# Altium footprint library PBL - SMD Packages.PcbLib: 148 footprints (part 10 of 10)
Each footprint in its own frame and in the unit in brackets; x right, y up, seen from the top. Pads: shape width x height; smd on the part's side, far side on the other; paste and mask are expansions set on the pad; w line width, h text height; cw(c..) or ccw(c..) is an arc to the next point about the centre after c.
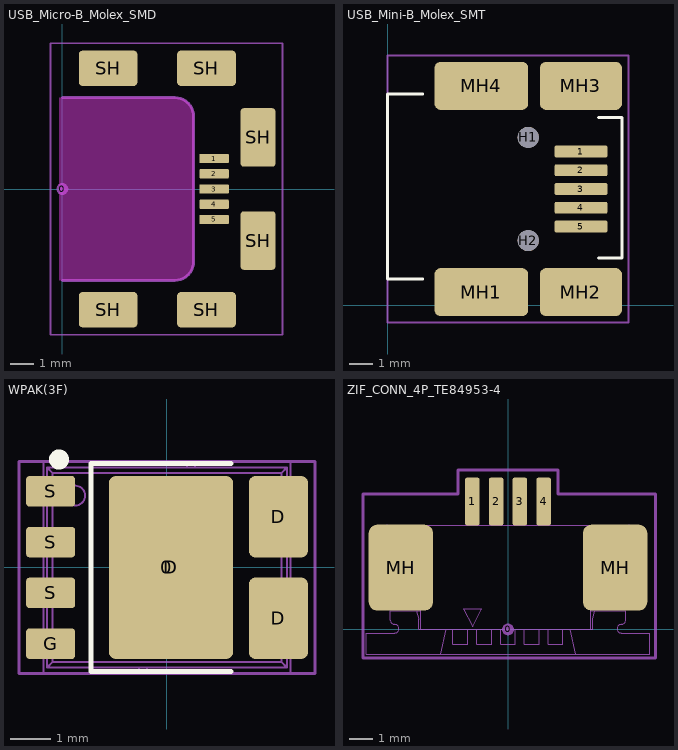
[diagram p9: the footprints below, top view; thin cyan lines are the x and y axes]

## USB_Micro-B_Molex_SMD [mm]
height 1.2
pads (12):
  round 0.508 on Mech15: 0(0,0)
  rrect20% 1.25x0.4 smd: 1(6.475,1.3) 2(6.475,0.65) 3(6.475,0) 4(6.475,-0.65) 5(6.475,-1.3)
  rrect20% 2.5x1.5 smd: SH(1.95,-5.15) SH(1.95,5.15) SH(6.15,-5.15) SH(6.15,5.15)
  rrect20% 1.5x2.5 smd: SH(8.35,-2.2) SH(8.35,2.2)
Top Solder:
  rectangle: 5.842,-1.27 7.112,1.27
Keep-Out Layer:
  board cut-out: -0.127,3.9 4.8,3.907 5.009,3.879 5.203,3.799 5.371,3.671 5.499,3.503 5.579,3.309 5.607,3.1 5.6,3.1 5.607,-3.1 5.579,-3.309 5.499,-3.503 5.371,-3.671 5.203,-3.799 5.009,-3.879 4.8,-3.907 4.8,-3.9 -0.127,-3.9
13 - 3D Top Side:
  lines w0.127: 0,-3.9 4.8,-3.9 ccw(c4.8,-3.1) 5.6,-3.1 5.6,3.1 ccw(c4.8,3.1) 4.8,3.9 0,3.9
15 - Top Courtyards:
  lines w0.076: -0.5,-6.223 -0.5,6.223 9.398,6.223 9.398,-6.223 -0.5,-6.223
3D body: height 4.1, standoff -4.1, extent -21.007,-5.35 3.492,5.35
3D body: height 1.43, standoff -1.52, extent -0.43,-5.5 8.7,5.5

## USB_Mini-B_Molex_SMT [mm]
height 3.95
pads (11):
  rrect25% 2.25x0.5 smd: 1(8.25,6.55) 2(8.25,5.75) 3(8.25,4.95) 4(8.25,4.15) 5(8.25,3.35)
  round 0.9 hole 0.9 unplated: H1(6,7.15) H2(6,2.75)
  rrect25% 4x2.05 smd: MH1(4,0.55) MH4(4,9.35)
  rrect25% 3.5x2.05 smd: MH2(8.25,0.55) MH3(8.25,9.35)
Top Overlay:
  lines w0.127: 1.5,1.1 0,1.1 0,9 1.5,9 ; 9,2 10,2 10,8 9,8
15 - Top Courtyards:
  lines w0.076: 0,-0.75 10.275,-0.75 10.275,10.65 0,10.65 0,-0.75
3D body: height 3.95, standoff 0, extent 0,1.1 9,9

## WPAK(3F) [mm] "Footprint similar to SOIC-8, Body 5.1x6.1mm, Pitch 1.27mm, IPC Medium Density"
height 0.85
pads (8):
  round 1 on Mech15: 0(0,0)
  rrect10% 3.1x4.57 smd: D(0.1,0)
  rrect20% 1.47x2.03 smd: D(2.785,-1.27) D(2.785,1.27)
  rrect20% 1.22x0.76 smd: G(-2.91,-1.905) S(-2.91,-0.635) S(-2.91,0.635) S(-2.91,1.905)
Top Overlay:
  circle w0.25: c-2.7,2.7 r0.125
  lines w0.127: 1.6,-2.6 -1.9,-2.6 -1.9,2.6 1.6,2.6
13 - 3D Top Side:
  circle w0.05: c-2.298,1.798 r0.25
  lines w0.05: -3.09,-2.115 -3.09,-2.64 -0.7,-2.64 ; -3.09,-1.695 -3.09,-0.845 ; -3.09,-0.425 -3.09,0.425 ; -3.09,0.845 -3.09,1.695 ; -3.09,2.115 -3.09,2.64 0.5,2.64 ; -3,-2.115 -3,-2.5 ; -3,-1.695 -3,-0.845 ; -3,-0.425 -3,0.425 ; -3,0.845 -3,1.695 ; -3,2.115 -3,2.5 ; -0.7,-2.5 -3,-2.5 ; -0.5,-2.64 3.09,-2.64 3.09,-2.115 ; -0.5,-2.5 3,-2.5 ; 0.5,2.5 -3,2.5 ; 0.7,2.5 3,2.5 ; 0.7,2.64 3.09,2.64 3.09,2.115 ; 3,-2.115 3,-2.5 ; 3,-1.695 3,-0.845 ; 3,-0.425 3,0.425 ; 3,0.845 3,1.695 ; 3,2.115 3,2.5 ; 3.09,-1.695 3.09,-0.845 ; 3.09,-0.425 3.09,0.425 ; 3.09,0.845 3.09,1.695 ; -3,-2.5 -2.864,-2.364 ; -3,2.5 -2.864,2.364 ; -2.864,-2.364 2.864,-2.364 ; -2.864,-2.364 -2.864,2.364 ; -2.864,2.364 2.864,2.364 ; 2.864,-2.364 2.864,2.364 ; 2.864,-2.364 3,-2.5 ; 2.864,2.364 3,2.5 ; -3.1,-2.115 -2.998,-2.115 -2.998,-1.695 -3.1,-1.695 -3.1,-2.115 ; -3.1,-0.845 -2.998,-0.845 -2.998,-0.425 -3.1,-0.425 -3.1,-0.845 ; -3.1,0.425 -2.998,0.425 -2.998,0.845 -3.1,0.845 -3.1,0.425 ; -3.1,1.695 -2.998,1.695 -2.998,2.115 -3.1,2.115 -3.1,1.695 ; -0.7,-2.65 -0.7,-2.498 -0.5,-2.498 -0.5,-2.65 -0.7,-2.65 ; 0.5,2.498 0.5,2.65 0.7,2.65 0.7,2.498 0.5,2.498 ; 2.998,-2.115 3.1,-2.115 3.1,-1.695 2.998,-1.695 2.998,-2.115 ; 2.998,-0.845 3.1,-0.845 3.1,-0.425 2.998,-0.425 2.998,-0.845 ; 2.998,0.425 3.1,0.425 3.1,0.845 2.998,0.845 2.998,0.425 ; 2.998,1.695 3.1,1.695 3.1,2.115 2.998,2.115 2.998,1.695
15 - Top Courtyards:
  lines w0.076: -3.7,-2.65 3.7,-2.65 3.7,2.65 -3.7,2.65 -3.7,-2.65
3D body: height 0.85, standoff 0, extent -3.1,-2.65 3.1,2.65

## ZIF_CONN_4P_TE84953-4 [mm] "TE Connectivity 4-pin ZIF connector"
height 2.74
pads (7):
  round 0.5 on Mech15: 0(0,0)
  rrect25% 0.61x2 smd: 1(-1.5,5.375) 2(-0.5,5.375) 3(0.5,5.375) 4(1.5,5.375)
  rrect25% 2.7x3.6 smd: MH(-4.5,2.6) MH(4.5,2.6)
13 - 3D Top Side:
  lines w0.05: -4.56,3.1 -3.93,3.1 ; -4.56,4.37 -4.56,0.87 -3.67,0.87 -3.67,0 ; -4.28,4.37 -4.18,3.997 -4.18,3.1 ; -4.18,0.86 -4.18,0.87 ; -3.982,0.87 -3.982,0.86 -5.072,0.86 cw(c-5.072,0.96) -5.172,0.96 -5.172,1.261 cw(c-5.072,1.261) -5.072,1.361 -4.762,1.361 ccw(c-4.762,1.461) -4.662,1.461 -4.662,1.763 ccw(c-4.762,1.763) -4.762,1.863 -5.072,1.863 cw(c-5.072,1.963) -5.172,1.963 -5.172,2.264 cw(c-5.072,2.264) -5.072,2.364 -4.762,2.364 ccw(c-4.762,2.464) -4.662,2.464 -4.662,2.766 ccw(c-4.762,2.766) -4.762,2.866 -5.072,2.866 cw(c-5.072,2.966) -5.172,2.966 -5.172,3.267 cw(c-5.072,3.267) -5.072,3.367 -4.762,3.367 ccw(c-4.762,3.467) -4.662,3.467 -4.662,3.769 ccw(c-4.762,3.769) -4.762,3.869 -5.072,3.869 cw(c-5.072,3.969) -5.172,3.969 -5.172,4.27 cw(c-5.072,4.27) -5.072,4.37 5.072,4.37 cw(c5.072,4.27) 5.172,4.27 5.172,3.969 cw(c5.072,3.969) 5.072,3.869 4.762,3.869 ccw(c4.762,3.769) 4.662,3.769 4.662,3.467 ccw(c4.762,3.467) 4.762,3.367 5.072,3.367 cw(c5.072,3.267) 5.172,3.267 5.172,2.966 cw(c5.072,2.966) 5.072,2.866 4.762,2.866 ccw(c4.762,2.766) 4.662,2.766 4.662,2.464 ccw(c4.762,2.464) 4.762,2.364 5.072,2.364 cw(c5.072,2.264) 5.172,2.264 5.172,1.963 cw(c5.072,1.963) 5.072,1.863 4.762,1.863 ccw(c4.762,1.763) 4.662,1.763 4.662,1.461 ccw(c4.762,1.461) 4.762,1.361 5.072,1.361 cw(c5.072,1.261) 5.172,1.261 5.172,0.96 cw(c5.072,0.96) 5.072,0.86 4.232,0.86 4.229,0.87 ; -3.93,0.87 -3.93,3.997 -3.83,4.37 ; -3.846,0.79 -3.75,0.43 -3.75,0 3.55,0 3.55,0.43 3.646,0.79 ; -3.67,0.79 -4.94,0.79 -4.94,0.39 ccw(c-4.76,0.39) -4.76,0.21 cw(c-4.76,0.03) -4.76,-0.15 -5.96,-0.15 -5.96,-1.04 5.96,-1.04 5.96,-0.15 4.76,-0.15 cw(c4.76,0.03) 4.76,0.21 ccw(c4.76,0.39) 4.94,0.39 4.94,0.79 3.47,0.79 ; -2.82,-1.04 -2.59,0 ; -2.311,0 -2.311,-0.63 -1.691,-0.63 -1.691,0 ; -1.596,4.37 -1.596,5.51 -1.396,5.51 -1.396,4.37 ; -1.596,4.88 -1.396,4.88 ; -1.596,5.01 -1.396,5.01 ; -1.596,5.38 -1.396,5.38 ; -1.311,0 -1.311,-0.63 -0.691,-0.63 -0.691,0 ; -0.596,4.37 -0.596,5.51 -0.396,5.51 -0.396,4.37 ; -0.596,4.88 -0.396,4.88 ; -0.596,5.01 -0.396,5.01 ; -0.596,5.38 -0.396,5.38 ; -0.31,0 -0.31,-0.63 0.309,-0.63 0.309,0 ; 0.405,4.37 0.405,5.51 0.604,5.51 0.604,4.37 ; 0.405,4.88 0.604,4.88 ; 0.405,5.01 0.604,5.01 ; 0.405,5.38 0.604,5.38 ; 0.69,0 0.69,-0.63 1.309,-0.63 1.309,0 ; 1.405,4.37 1.405,5.51 1.605,5.51 1.605,4.37 ; 1.405,4.88 1.605,4.88 ; 1.405,5.01 1.605,5.01 ; 1.405,5.38 1.605,5.38 ; 1.69,0 1.69,-0.63 2.31,-0.63 2.31,0 ; 2.59,0 2.82,-1.04 ; 3.47,0 3.47,0.87 4.56,0.87 4.56,4.37 ; 3.83,0.87 3.93,1.243 3.93,4.37 ; 3.93,2.14 4.18,2.14 4.18,1.243 4.28,0.87 ; 4.18,1.92 4.56,1.92 ; -1.871,0.87 -1.111,0.87 -1.49,0.11 -1.871,0.87
15 - Top Courtyards:
  lines w0.127: -6.1,-1.2 -6.1,5.7 -2.1,5.7 -2.1,6.7 2.1,6.7 2.1,5.7 6.2,5.7 6.2,-1.2 -6.1,-1.2
3D body: height 2.58, standoff 0, extent -5.96,-1.04 5.96,5.51